# Altium footprint library ecg_device_components.PcbLib: 31 footprints (part 1 of 2)
Each footprint in its own frame and in the unit in brackets; x right, y up, seen from the top. Pads: shape width x height; smd on the part's side, far side on the other; paste and mask are expansions set on the pad; w line width, h text height; cw(c..) or ccw(c..) is an arc to the next point about the centre after c.
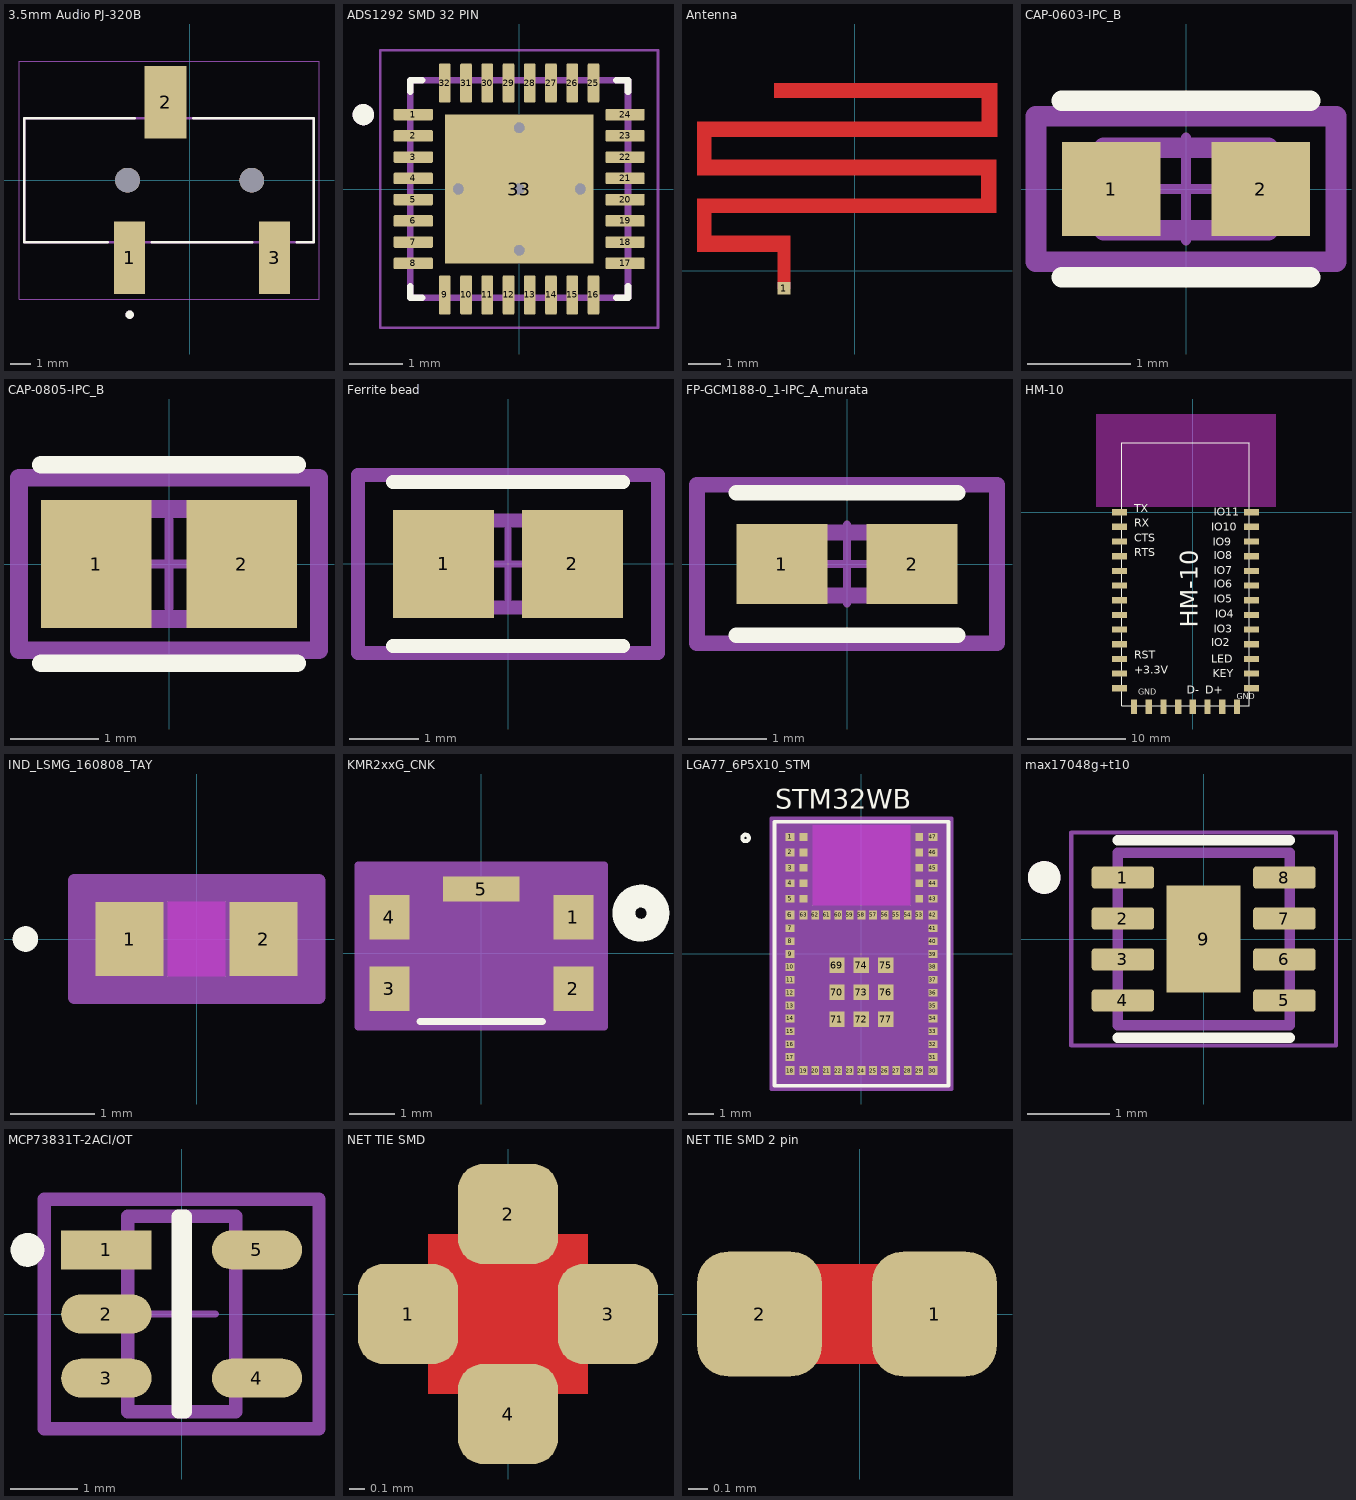
[diagram p0: the footprints below, top view; thin cyan lines are the x and y axes]

## 1K Resistor SMD 0805 [mm] "Largest footprint"

## 3.5mm Audio PJ-320B [mm]
pads (5):
  rect 1.5x3.5 smd: 1(-2.9,-3.75) 3(4.1,-3.75)
  rect 2.032x3.5 smd: 2(-1.168,3.759)
  round 1.2 hole 1.2 unplated: ""(-3,0) ""(3,0)
Top Overlay:
  circle w0.2: c-2.9,-6.5 r0.1
  lines w0.127: -3.97,-3 -8,-3 -8,3 -2.667,3 ; -1.83,-3 3.03,-3 ; 0.17,3 6,3 6,-3 5.17,-3
Mechanical 13:
  circle w0.2: c-2.9,-6.5 r0.1
  lines w0.127: -8,-3 6,-3 6,2.997 -8,2.997 -8,-3
Mechanical 15:
  lines w0.05: -8.25,-5.75 -8.25,5.75 6.25,5.75 6.25,-5.75 -8.25,-5.75
3D body "step_temp.STEP": height 5, standoff -0.5, extent -7.648,-5.123 6.352,5.377

## ADS1292 SMD 32 PIN [mm]
pads (38):
  rrect25% 0.74x0.22 smd: 1(-1.995,1.4) 2(-1.995,1) 3(-1.995,0.6) 4(-1.995,0.2) 5(-1.995,-0.2) 6(-1.995,-0.6) 7(-1.995,-1) 8(-1.995,-1.4) 17(1.995,-1.4) 18(1.995,-1) 19(1.995,-0.6) 20(1.995,-0.2) 21(1.995,0.2) 22(1.995,0.6) 23(1.995,1) 24(1.995,1.4)
  rrect25% 0.22x0.74 smd: 9(-1.4,-1.995) 10(-1,-1.995) 11(-0.6,-1.995) 12(-0.2,-1.995) 13(0.2,-1.995) 14(0.6,-1.995) 15(1,-1.995) 16(1.4,-1.995) 25(1.4,1.995) 26(1,1.995) 27(0.6,1.995) 28(0.2,1.995) 29(-0.2,1.995) 30(-0.6,1.995) 31(-1,1.995) 32(-1.4,1.995)
  rect 2.8x2.8 smd paste-2: 33(0,0)
  round 0.3 hole 0.2: 33_1(0,1.15) 33_2(-1.15,0) 33_3(0,0) 33_4(1.15,0) 33_5(0,-1.15)
Top Overlay:
  circle w0.2: c-2.935,1.4 r0.1
  lines w0.127: -2.05,-1.83 -2.05,-2.05 -1.83,-2.05 ; -2.05,1.83 -2.05,2.05 -1.83,2.05 ; 1.83,-2.05 2.05,-2.05 2.05,-1.83 ; 1.83,2.05 2.05,2.05 2.05,1.83
Top Paste:
  region: -0.1,0.1 -1.24,0.1 -1.24,1.24 -0.1,1.24
  region: 1.24,0.1 0.1,0.1 0.1,1.24 1.24,1.24
  region: 1.24,-1.24 0.1,-1.24 0.1,-0.1 1.24,-0.1
  region: -0.1,-1.24 -1.24,-1.24 -1.24,-0.1 -0.1,-0.1
Mechanical 13:
  circle w0.2: c-2.935,1.4 r0.1
  lines w0.127: -2.05,-2.05 2.05,-2.05 2.05,2.05 -2.05,2.05 -2.05,-2.05
Mechanical 15:
  lines w0.05: -2.615,-2.615 2.615,-2.615 2.615,2.615 -2.615,2.615 -2.615,-2.615
3D body "step_temp.STEP": height 1, standoff 0, extent -2,-2 2,2

## Antenna [mm]
pads (1):
  rect 0.4x0.4 smd: 1(-2.22,-0.549)
Top Layer:
  region: -2.52,5.876 4.455,5.876 4.455,4.2 -4.495,4.2 -4.495,3.476 4.43,3.476 4.43,1.826 -4.495,1.826 -4.495,1.101 -2.02,1.101 -2.02,-0.549 -2.42,-0.549 -2.42,0.601 -4.945,0.601 -4.945,2.251 3.955,2.251 3.955,3.001 -4.945,3.001 -4.945,4.676 3.98,4.676 3.98,5.426 -2.52,5.426

## CAP-0603-IPC_B [mm]
pads (2):
  rect 0.959x0.912 smd paste+0 mask+0: 1(-0.727,0) 2(0.727,0)
Top Overlay:
  lines w0.2: -1.206,-0.856 1.206,-0.856 ; -1.206,0.856 1.206,0.856
Top 3D Body:
  lines w0.2: -0.8,-0.4 0.8,-0.4 0.8,0.4 -0.8,0.4 -0.8,-0.4
Top Courtyard:
  lines w0.2: -1.456,-0.706 1.456,-0.706 1.456,0.706 -1.456,0.706 -1.456,-0.706
Top Assembly:
  lines w0.2: -1.456,-0.706 1.456,-0.706 1.456,0.706 -1.456,0.706 -1.456,-0.706
  text ".Designator" at 0,0.188 h1
Top Component Center:
  lines w0.1: -0.5,0 0.5,0 ; 0,-0.5 0,0.5
3D body "Cap_Murata_GCM1885C2A5R3BA16J_eec.STEP": height 0.25, standoff 0, extent -1.456,-0.706 1.456,0.706

## CAP-0805-IPC_B [mm]
pads (2):
  rect 1.255x1.456 smd paste+0 mask+0: 1(-0.826,0) 2(0.826,0)
Top Overlay:
  lines w0.2: -1.453,-1.128 1.453,-1.128 ; -1.453,1.128 1.453,1.128
Top 3D Body:
  lines w0.2: -1,-0.625 1,-0.625 1,0.625 -1,0.625 -1,-0.625
Top Courtyard:
  lines w0.2: -1.703,-0.978 1.703,-0.978 1.703,0.978 -1.703,0.978 -1.703,-0.978
Top Assembly:
  lines w0.2: -1.703,-0.978 1.703,-0.978 1.703,0.978 -1.703,0.978 -1.703,-0.978
  text ".Designator" at 0,0.188 h1
Top Component Center:
  lines w0.1: -0.5,0 0.5,0 ; 0,-0.5 0,0.5
3D body "Cap_Samsung_CL21B273KBANNNC_eec.STEP": height 0.25, standoff 0, extent -1.703,-0.978 1.703,0.978

## Ferrite bead [mm]
pads (2):
  rect 1.455x1.556 smd paste+0 mask+0: 1(-0.926,0) 2(0.926,0)
Top Overlay:
  lines w0.2: -1.653,-1.178 1.653,-1.178 ; -1.653,1.178 1.653,1.178
Top 3D Body:
  lines w0.2: -1,-0.625 1,-0.625 1,0.625 -1,0.625 -1,-0.625
Top Courtyard:
  lines w0.2: -2.153,-1.278 2.153,-1.278 2.153,1.278 -2.153,1.278 -2.153,-1.278
Top Assembly:
  lines w0.2: -2.153,-1.278 2.153,-1.278 2.153,1.278 -2.153,1.278 -2.153,-1.278
  text ".Designator" at 0,0.188 h1
Top Component Center:
  lines w0.1: -0.5,0 0.5,0 ; 0,-0.5 0,0.5
3D body "FBead_Murata_BLM21AG102SN1D_eec.STEP": height 0.25, standoff 0, extent -2.153,-1.278 2.153,1.278

## FP-GCM188-0_1-IPC_A_murata [mm]
pads (2):
  rect 1.159x1.012 smd paste+0 mask+0: 1(-0.827,0) 2(0.827,0)
Top Overlay:
  lines w0.2: -1.406,-0.906 1.406,-0.906 ; -1.406,0.906 1.406,0.906
Top 3D Body:
  lines w0.2: -0.8,-0.4 -0.8,0.4 0.8,0.4 0.8,-0.4 -0.8,-0.4
Top Courtyard:
  lines w0.2: -1.906,-1.006 -1.906,1.006 1.906,1.006 1.906,-1.006 -1.906,-1.006
Top Assembly:
  lines w0.2: -1.906,-1.006 -1.906,1.006 1.906,1.006 1.906,-1.006 -1.906,-1.006
  text ".Designator" at 0,0.188 h1
Top Component Center:
  lines w0.1: -0.5,0 0.5,0 ; 0,-0.5 0,0.5
3D body "Cap_Murata_GCM1885C2A5R3BA16J_eec.STEP": height 0.25, standoff 0, extent -1.906,-1.006 1.906,1.006

## HM-10 [mm]
pads (34):
  rect 1.5x0.635 smd: 1(-7.5,0) 2(-7.5,-1.5) 3(-7.5,-3) 4(-7.5,-4.5) 5(-7.5,-6) 6(-7.5,-7.5) 8(-7.5,-10.5) 9(-7.5,-12) 10(-7.5,-13.5) 11(-7.5,-15) 12(-7.5,-16.5) 13(-7.5,-18) 22(6,-18) 23(6,-16.5) 24(6,-15) 25(6,-13.5) 26(6,-12) 27(6,-10.5) 28(6,-9) 29(6,-7.5) 30(6,-6) 31(6,-4.5) 32(6,-3) 33(6,-1.5) 34(6,0) $7(-7.5,-9)
  rect 0.635x1.5 smd: 14(-6,-19.875) 15(-4.5,-19.875) 16(-3,-19.875) 17(-1.5,-19.875) 18(0,-19.875) 19(1.5,-19.875) 20(3,-19.875) 21(4.5,-19.875)
Top Layer keep-out:
  rectangle: -9.906,0.508 8.509,10.033
Top Overlay:
  lines w0.127: -7.25,-19.8 -7.25,7.1 5.75,7.1 5.75,-19.8 -7.25,-19.8
  text "HM-10" at 0.508,-11.811 h1.78
  text "IO11" at 2.159,-0.381 h0.81
  text "IO10" at 1.905,-1.905 h0.81
  text "IO9" at 2.032,-3.429 h0.81
  text "IO8" at 2.159,-4.826 h0.81
  text "IO7" at 2.159,-6.35 h0.81
  text "IO6" at 2.159,-7.747 h0.81
  text "IO5" at 2.159,-9.271 h0.81
  text "IO4" at 2.286,-10.795 h0.81
  text "IO3" at 2.159,-12.319 h0.81
  text "IO2" at 1.905,-13.716 h0.81
  text "LED" at 1.905,-15.367 h0.81
  text "KEY" at 2.032,-16.891 h0.81
  text "GND" at 4.5,-19.125 h0.61
  text "D+" at 1.27,-18.542 h0.81
  text "D-" at -0.635,-18.542 h0.81
  text "GND" at -5.588,-18.669 h0.61
  text "+3.3V" at -6,-16.5 h0.81
  text "RST" at -6,-15 h0.81
  text "RTS" at -6,-4.5 h0.81
  text "CTS" at -6,-3 h0.81
  text "RX" at -6,-1.5 h0.81
  text "TX" at -6,0 h0.81
Keep-Out Layer:
  rectangle: -9.906,0.508 8.509,10.033
3D body "step_temp.STEP": height 2.2, standoff 0, extent -7.262,-19.8 5.738,7.1

## IND_LSMG_160808_TAY [mil]
pads (2):
  rect 32x35 smd paste+0 mask+0: 1(-31.5,0) 2(31.5,0)
Top Layer keep-out:
  region: -13.5,-15.5 -13.5,15.5 13.5,15.5 13.5,-15.5
Top Overlay:
  circle w6: c-80.5,0 r3
Keep-Out Layer:
  region: -13.5,-17.5 -13.5,17.5 13.5,17.5 13.5,-17.5
Mechanical 13:
  circle w0: c-26.5,0 r3
  lines w1: -33.5,-17.5 -33.5,17.5 ; -33.5,-17.5 33.5,-17.5 ; -33.5,-17.5 -15.5,-17.5 -15.5,17.5 -33.5,17.5 ; -33.5,-17.5 -33.5,17.5 ; -33.5,17.5 33.5,17.5 ; 33.5,-17.5 33.5,17.5 ; 33.5,-17.5 33.5,17.5 ; 33.5,-17.5 15.5,-17.5 15.5,17.5 33.5,17.5
Mechanical 15:
  region: 57.5,-27.5 -57.5,-27.5 -57.5,27.5 57.5,27.5
  lines w6: -57.5,-27.5 57.5,-27.5 57.5,27.5 -57.5,27.5 -57.5,-27.5
3D body "IND_LSMG_160808_TAY.step": height 35, standoff 0, extent -33.5,-17.48 33.5,17.48

## KMR2xxG_CNK [mil]
pads (5):
  rect 35x39 smd paste+0 mask+0: 1(80.71,31.5) 2(80.71,-31.5) 3(-80.71,-31.5) 4(-80.71,31.5)
  rect 67x22 smd paste+0 mask+0: 5(0,56.1)
Top Overlay:
  circle w20: c140,35 r15
  lines w6: -53.69,-60 53.69,-60
Bottom Overlay:
  circle w5: c138.21,31.5 r5
Mechanical 13:
  circle w20: c80.71,31.5 r15
  lines w1: -90.5,-55 90.5,-55 90.5,55 -90.5,55 -90.5,-55
Mechanical 15:
  region: 108.21,77.1 -108.21,77.1 -108.21,-65 108.21,-65
  lines w6: -108.21,-65 -108.21,77.1 108.21,77.1 108.21,-65 -108.21,-65

## LGA77_6P5X10_STM [mm]
pads (77):
  rect 0.35x0.3 smd paste+0 mask+0: 1(-2.775,4.537) 2(-2.775,3.938) 3(-2.775,3.337) 4(-2.775,2.738) 5(-2.775,2.137) 7(-2.775,0.988) 8(-2.775,0.487) 9(-2.775,-0.012) 10(-2.775,-0.513) 11(-2.775,-1.012) 12(-2.775,-1.512) 13(-2.775,-2.013) 14(-2.775,-2.512) 15(-2.775,-3.013) 16(-2.775,-3.512) 17(-2.775,-4.012) 31(2.775,-4.012) 32(2.775,-3.512) 33(2.775,-3.013) 34(2.775,-2.512) 35(2.775,-2.013) 36(2.775,-1.512) 37(2.775,-1.012) 38(2.775,-0.513) 39(2.775,-0.012) 40(2.775,0.487) 41(2.775,0.988) 43(2.775,2.137) 44(2.775,2.738) 45(2.775,3.337) 46(2.775,3.938) 47(2.775,4.537)
  rect 0.35x0.35 smd paste+0 mask+0: 6(-2.775,1.512) 18(-2.775,-4.537) 30(2.775,-4.537) 42(2.775,1.512)
  rect 0.3x0.35 smd paste+0 mask+0: 19(-2.25,-4.537) 20(-1.8,-4.537) 21(-1.35,-4.537) 22(-0.9,-4.537) 23(-0.45,-4.537) 24(0,-4.537) 25(0.45,-4.537) 26(0.9,-4.537) 27(1.35,-4.537) 28(1.8,-4.537) 29(2.25,-4.537) 53(2.25,1.512) 54(1.8,1.512) 55(1.35,1.512) 56(0.9,1.512) 57(0.45,1.512) 58(0,1.512) 59(-0.45,1.512) 60(-0.9,1.512) 61(-1.35,1.512) 62(-1.8,1.512) 63(-2.25,1.512)
  rect 0.3x0.3 smd paste+0 mask+0: 48(2.25,4.537) 49(2.25,3.938) 50(2.25,3.337) 51(2.25,2.738) 52(2.25,2.137) 64(-2.25,2.137) 65(-2.25,2.738) 66(-2.25,3.337) 67(-2.25,3.938) 68(-2.25,4.537)
  rect 0.6x0.6 smd paste+0 mask+0: 69(-0.95,-0.45) 70(-0.95,-1.5) 71(-0.95,-2.55) 72(0,-2.55) 73(0,-1.5) 74(0,-0.45) 75(0.95,-0.45) 76(0.95,-1.5) 77(0.95,-2.55)
Top Layer keep-out:
  region: -1.899,5 -1.899,1.88 1.899,1.88 1.899,5
Top Overlay:
  circle w0.152: c-4.5,4.5 r0.127
  lines w0.152: -3.377,-5.127 3.377,-5.127 3.377,5.127 -3.377,5.127 -3.377,-5.127
  text "STM32WB" at -3.353,5.639 h0.76
Mechanical 13:
  circle w0.025: c-2.6,4.54 r0.076
  lines w0.025: -0.305,5 ccw(c0,5) 0.305,5 ; -3.25,-5 3.25,-5 3.25,5 -3.25,5 -3.25,-5
Mechanical 15:
  region: -3.504,-4.944 -3.504,4.944 -3.504,5.254 3.504,5.254 3.504,4.944 3.504,-4.944 3.504,-5.254 -3.504,-5.254
  lines w0.152: -3.504,-5.254 -3.504,-4.944 -3.504,4.944 -3.504,5.254 3.504,5.254 3.504,4.944 3.504,-4.944 3.504,-5.254 -3.504,-5.254

## max17048g+t10 [mm]
pads (9):
  rrect25% 0.76x0.27 smd: 1(-0.985,0.75) 2(-0.985,0.25) 3(-0.985,-0.25) 4(-0.985,-0.75) 5(0.985,-0.75) 6(0.985,-0.25) 7(0.985,0.25) 8(0.985,0.75)
  rect 0.9x1.3 smd paste-2: 9(0,0)
Top Overlay:
  circle w0.2: c-1.945,0.75 r0.1
  lines w0.127: -1.05,-1.205 1.05,-1.205 ; -1.05,1.205 1.05,1.205
Top Paste:
  region: 0.28,-0.41 -0.28,-0.41 -0.28,0.41 0.28,0.41
Mechanical 13:
  circle w0.2: c-1.945,0.75 r0.1
  lines w0.127: -1.05,-1.05 -1.05,1.05 1.05,1.05 1.05,-1.05 -1.05,-1.05
Mechanical 15:
  lines w0.05: -1.615,-1.3 -1.615,1.3 1.615,1.3 1.615,-1.3 -1.615,-1.3
3D body "step_temp.STEP": height 0.8, standoff 0, extent -1,-1 1,1

## MCP73831T-2ACI/OT [mm]
pads (5):
  rect 1.338x0.578 smd paste+0 mask+0: 1(-1.116,0.95)
  rrect100% 1.338x0.578 smd paste+0 mask+0: 2(-1.116,0) 3(-1.116,-0.95) 4(1.116,-0.95) 5(1.116,0.95)
Top Overlay:
  circle w0.25: c-2.285,0.95 r0.125
  lines w0.2: -0.053,-1.45 -0.053,1.45 0.053,1.45 0.053,-1.45 -0.053,-1.45
Top 3D Body:
  lines w0.2: -0.8,-1.45 0.8,-1.45 0.8,1.45 -0.8,1.45 -0.8,-1.45
Top Courtyard:
  lines w0.2: -2.035,-1.7 2.035,-1.7 2.035,1.7 -2.035,1.7 -2.035,-1.7
Top Assembly:
  lines w0.2: -2.035,-1.7 2.035,-1.7 2.035,1.7 -2.035,1.7 -2.035,-1.7
  text ".Designator" at 0,0.188 h1
Top Component Center:
  lines w0.1: -0.5,0 0.5,0 ; 0,-0.5 0,0.5

## NET TIE SMD [mil]
pads (4):
  rrect50% 25x25 smd mask+0: 1(-25,-5) 2(0,20) 3(25,-5) 4(0,-30)
Top Layer:
  rectangle: -20,-25 20,15

## NET TIE SMD 2 pin [mil]
pads (2):
  rrect50% 25x25 smd mask+0: 1(15,0) 2(-20,0)
Top Layer:
  rectangle: -10,-10 5,10